# Altium footprint library ProjectFootprints-20261027_001106_796.PcbLib: 50 footprints (part 1 of 4)
Each footprint in its own frame and in the unit in brackets; x right, y up, seen from the top. Pads: shape width x height; smd on the part's side, far side on the other; paste and mask are expansions set on the pad; w line width, h text height; cw(c..) or ccw(c..) is an arc to the next point about the centre after c.
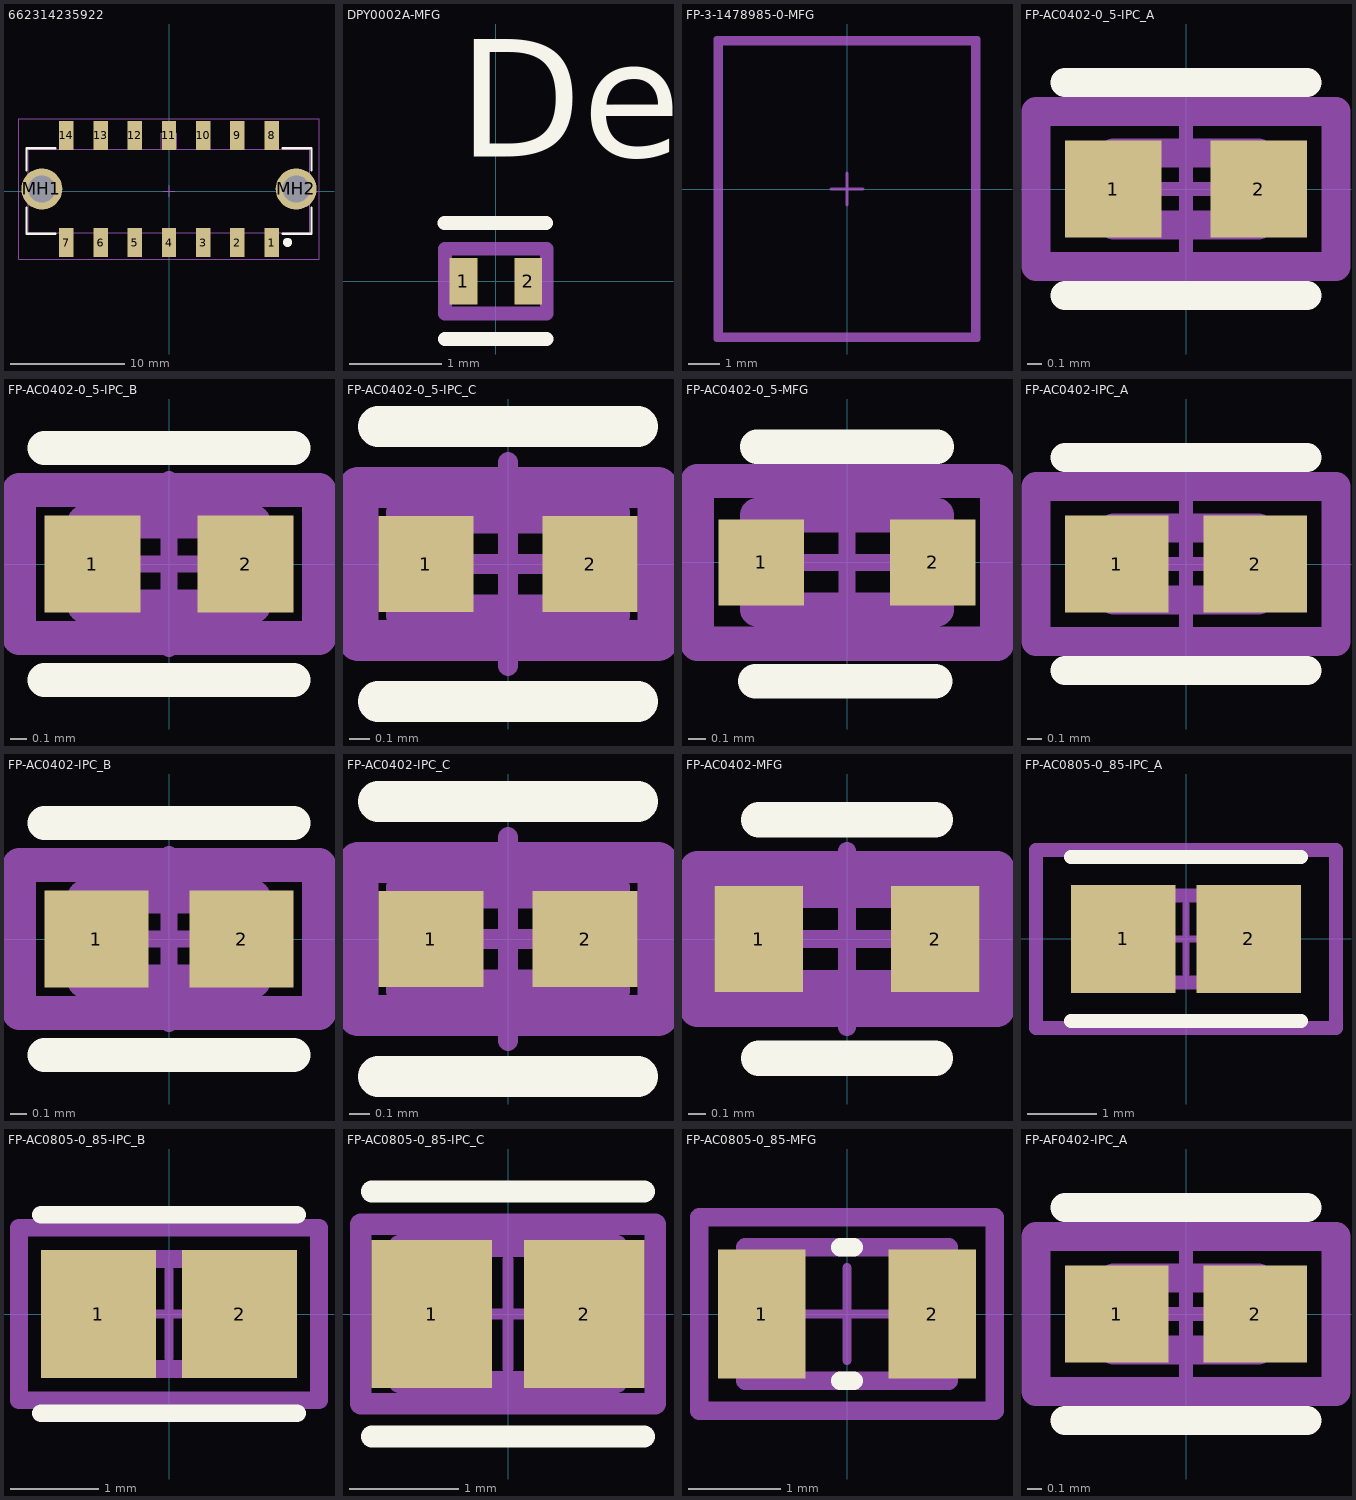
[diagram p0: the footprints below, top view; thin cyan lines are the x and y axes]

## 662314235922 [mm] "3.00mm SMT Male Dual Row Vertical Header with THT Retention Clip, 14p"
height 9.9
pads (16):
  rect 1.27x2.54 smd: 1(9,-4.52) 2(6,-4.52) 3(3,-4.52) 4(0,-4.52) 5(-3,-4.52) 6(-6,-4.52) 7(-9,-4.52) 8(9,4.88) 9(6,4.88) 10(3,4.88) 11(0,4.88) 12(-3,4.88) 13(-6,4.88) 14(-9,4.88)
  round 3.6 hole 2.41: MH1(-11.16,0.18) MH2(11.16,0.18)
Top Overlay:
  circle w0.4: c10.4,-4.5 r0.2
  lines w0.2: -12.5,-1.455 -12.5,-3.755 -9.95,-3.755 ; -12.5,1.815 -12.5,3.755 -9.95,3.755 ; 9.95,-3.755 12.5,-3.755 12.5,-1.455 ; 9.95,3.755 12.5,3.755 12.5,1.815
Top Designator:
  text ".Designator" at -7.498,-0.5 h1.5
Top Component Outline:
  lines w0.1: -9.32,-3.68 -9.32,-5.45 -8.68,-5.45 -8.68,-3.68 ; -9.32,3.68 -9.32,5.95 -8.68,5.95 -8.68,3.68 ; -6.32,-3.68 -6.32,-5.45 -5.68,-5.45 -5.68,-3.68 ; -6.32,3.68 -6.32,5.95 -5.68,5.95 -5.68,3.68 ; -3.32,-3.68 -3.32,-5.45 -2.68,-5.45 -2.68,-3.68 ; -3.32,3.68 -3.32,5.95 -2.68,5.95 -2.68,3.68 ; -0.7,3.68 -0.7,5.08 0.7,5.08 0.7,3.68 ; -0.32,-3.68 -0.32,-5.45 0.32,-5.45 0.32,-3.68 ; -0.32,3.68 -0.32,5.95 0.32,5.95 0.32,3.68 ; 2.68,-3.68 2.68,-5.45 3.32,-5.45 3.32,-3.68 ; 2.68,3.68 2.68,5.95 3.32,5.95 3.32,3.68 ; 5.68,-3.68 5.68,-5.45 6.32,-5.45 6.32,-3.68 ; 5.68,3.68 5.68,5.95 6.32,5.95 6.32,3.68 ; 8.68,-3.68 8.68,-5.45 9.32,-5.45 9.32,-3.68 ; 8.68,3.68 8.68,5.95 9.32,5.95 9.32,3.68 ; -12.35,-3.68 -12.35,3.68 12.35,3.68 12.35,-3.68 -12.35,-3.68
Top 3D Body:
  lines w0.1: -9.32,-3.68 -9.32,-5.45 -8.68,-5.45 -8.68,-3.68 ; -9.32,3.68 -9.32,5.95 -8.68,5.95 -8.68,3.68 ; -6.32,-3.68 -6.32,-5.45 -5.68,-5.45 -5.68,-3.68 ; -6.32,3.68 -6.32,5.95 -5.68,5.95 -5.68,3.68 ; -3.32,-3.68 -3.32,-5.45 -2.68,-5.45 -2.68,-3.68 ; -3.32,3.68 -3.32,5.95 -2.68,5.95 -2.68,3.68 ; -0.7,3.68 -0.7,5.08 0.7,5.08 0.7,3.68 ; -0.32,-3.68 -0.32,-5.45 0.32,-5.45 0.32,-3.68 ; -0.32,3.68 -0.32,5.95 0.32,5.95 0.32,3.68 ; 2.68,-3.68 2.68,-5.45 3.32,-5.45 3.32,-3.68 ; 2.68,3.68 2.68,5.95 3.32,5.95 3.32,3.68 ; 5.68,-3.68 5.68,-5.45 6.32,-5.45 6.32,-3.68 ; 5.68,3.68 5.68,5.95 6.32,5.95 6.32,3.68 ; 8.68,-3.68 8.68,-5.45 9.32,-5.45 9.32,-3.68 ; 8.68,3.68 8.68,5.95 9.32,5.95 9.32,3.68 ; -12.35,-3.68 -12.35,3.68 12.35,3.68 12.35,-3.68 -12.35,-3.68
Top Courtyard:
  lines w0.05: -13.16,-5.99 13.16,-5.99 13.16,6.35 -13.16,6.35 -13.16,-5.99
Top Component Center:
  lines w0.05: -0.5,0 0.5,0 ; 0,-0.5 0,0.5
3D body "662314235922.stp": height 11.42, standoff -3.08, extent -12.35,-5.45 12.35,5.95

## DPY0002A-MFG [mm]
pads (2):
  rect 0.3x0.5 smd paste+0 mask+0: 1(-0.35,0) 2(0.35,0)
Top Overlay:
  lines w0.15: -0.556,0.629 0.544,0.629 ; -0.55,-0.625 0.55,-0.625
  text ".Designator" at -3.492,-0.635 h1.27
  text "Designator920" at -0.406,1.346 h1.27
Top 3D Body:
  lines w0.15: -0.55,-0.35 0.55,-0.35 0.55,0.35 -0.55,0.35 -0.55,-0.35
  text ".Designator" at -3.492,-0.635 h1.27
3D body "DPY0002A.stp": height 0.45, standoff 0, extent -0.5,-0.3 0.5,0.3

## FP-3-1478985-0-MFG [mm]
Top Assembly:
  lines w0.2: -4.1,-4.72 4.1,-4.72 4.1,4.72 -4.1,4.72 -4.1,-4.72
Top 3D Body:
  lines w0.2: -4,-4.62 4,-4.62 4,4.62 -4,4.62 -4,-4.62
Top Courtyard:
  lines w0.2: -4.1,-4.72 4.1,-4.72 4.1,4.72 -4.1,4.72 -4.1,-4.72
Top Component Center:
  lines w0.1: -0.5,0 0.5,0 ; 0,-0.5 0,0.5
3D body "Conn_TE_Connectivity_3-1478985-0_eec.STEP": height 0.25, standoff 0, extent -4.1,-4.72 4.1,4.72

## FP-AC0402-0_5-IPC_A [mm]
pads (2):
  rect 0.666x0.672 smd paste+0 mask+0: 1(-0.503,0) 2(0.503,0)
Top Overlay:
  lines w0.2: -0.836,-0.736 0.836,-0.736 ; -0.836,0.736 0.836,0.736
Top Assembly:
  lines w0.2: -1.036,-0.536 1.036,-0.536 1.036,0.536 -1.036,0.536 -1.036,-0.536
  text ".Designator" at 0,0.188 h1
Top 3D Body:
  lines w0.2: -0.5,-0.25 0.5,-0.25 0.5,0.25 -0.5,0.25 -0.5,-0.25
Top Courtyard:
  lines w0.2: -1.036,-0.536 1.036,-0.536 1.036,0.536 -1.036,0.536 -1.036,-0.536
Top Component Center:
  lines w0.1: -0.5,0 0.5,0 ; 0,-0.5 0,0.5
3D body "Cap_Yageo_AC0402KRX7R7BB471_eec.STEP": height 0.25, standoff 0, extent -1.036,-0.536 1.036,0.536

## FP-AC0402-0_5-IPC_B [mm]
pads (2):
  rect 0.566x0.572 smd paste+0 mask+0: 1(-0.453,0) 2(0.453,0)
Top Overlay:
  lines w0.2: -0.736,-0.686 0.736,-0.686 ; -0.736,0.686 0.736,0.686
Top Assembly:
  lines w0.2: -0.886,-0.436 -0.886,0.436 0.886,0.436 0.886,-0.436 -0.886,-0.436
  text ".Designator" at 0,0.188 h1
Top 3D Body:
  lines w0.2: -0.5,-0.25 -0.5,0.25 0.5,0.25 0.5,-0.25 -0.5,-0.25
Top Courtyard:
  lines w0.2: -0.886,-0.436 -0.886,0.436 0.886,0.436 0.886,-0.436 -0.886,-0.436
Top Component Center:
  lines w0.1: -0.5,0 0.5,0 ; 0,-0.5 0,0.5
3D body "Cap_Yageo_AC0402KRX7R7BB471_eec.STEP": height 0.25, standoff 0, extent -0.886,-0.436 0.886,0.436

## FP-AC0402-0_5-IPC_C [mm]
pads (2):
  rect 0.466x0.472 smd paste+0 mask+0: 1(-0.403,0) 2(0.403,0)
Top Overlay:
  lines w0.2: -0.636,-0.675 0.636,-0.675 ; -0.636,0.675 0.636,0.675
Top Assembly:
  lines w0.2: -0.736,-0.375 -0.736,0.375 0.736,0.375 0.736,-0.375 -0.736,-0.375
  text ".Designator" at 0,0.188 h1
Top 3D Body:
  lines w0.2: -0.5,-0.25 -0.5,0.25 0.5,0.25 0.5,-0.25 -0.5,-0.25
Top Courtyard:
  lines w0.2: -0.736,-0.375 -0.736,0.375 0.736,0.375 0.736,-0.375 -0.736,-0.375
Top Component Center:
  lines w0.1: -0.5,0 0.5,0 ; 0,-0.5 0,0.5
3D body "Cap_Yageo_AC0402KRX7R7BB471_eec.STEP": height 0.25, standoff 0, extent -0.736,-0.375 0.736,0.375

## FP-AC0402-0_5-MFG [mm]
pads (2):
  rect 0.5x0.5 smd paste+0 mask+0: 1(-0.5,0) 2(0.5,0)
Top Overlay:
  lines w0.2: -0.536,-0.693 0.514,-0.693 ; -0.525,0.675 0.525,0.675
Top Assembly:
  lines w0.2: -0.875,-0.475 -0.875,0.475 0.875,0.475 0.875,-0.475 -0.875,-0.475
  text ".Designator" at 0,0.188 h1
Top 3D Body:
  lines w0.2: -0.525,-0.275 -0.525,0.275 0.525,0.275 0.525,-0.275 -0.525,-0.275
Top Courtyard:
  lines w0.2: -0.875,-0.475 -0.875,0.475 0.875,0.475 0.875,-0.475 -0.875,-0.475
Top Component Center:
  lines w0.1: -0.5,0 0.5,0 ; 0,-0.5 0,0.5
3D body "Cap_Yageo_AC0402KRX7R7BB471_eec.STEP": height 0.25, standoff 0, extent -0.875,-0.475 0.875,0.475

## FP-AC0402-IPC_A [mm]
pads (2):
  rect 0.715x0.672 smd paste+0 mask+0: 1(-0.479,0) 2(0.479,0)
Top Overlay:
  lines w0.2: -0.836,-0.736 0.836,-0.736 ; -0.836,0.736 0.836,0.736
Top Assembly:
  lines w0.2: -1.036,-0.536 -1.036,0.536 1.036,0.536 1.036,-0.536 -1.036,-0.536
  text ".Designator" at 0,0.188 h1
Top 3D Body:
  lines w0.2: -0.5,-0.25 -0.5,0.25 0.5,0.25 0.5,-0.25 -0.5,-0.25
Top Courtyard:
  lines w0.2: -1.036,-0.536 -1.036,0.536 1.036,0.536 1.036,-0.536 -1.036,-0.536
Top Component Center:
  lines w0.1: -0.5,0 0.5,0 ; 0,-0.5 0,0.5
3D body "Res_Yageo_AC0402FR-0716R2L_eec.STEP": height 0.25, standoff 0, extent -1.036,-0.536 1.036,0.536

## FP-AC0402-IPC_B [mm]
pads (2):
  rect 0.615x0.572 smd paste+0 mask+0: 1(-0.429,0) 2(0.429,0)
Top Overlay:
  lines w0.2: -0.736,-0.686 0.736,-0.686 ; -0.736,0.686 0.736,0.686
Top Assembly:
  lines w0.2: -0.886,-0.436 -0.886,0.436 0.886,0.436 0.886,-0.436 -0.886,-0.436
  text ".Designator" at 0,0.188 h1
Top 3D Body:
  lines w0.2: -0.5,-0.25 -0.5,0.25 0.5,0.25 0.5,-0.25 -0.5,-0.25
Top Courtyard:
  lines w0.2: -0.886,-0.436 -0.886,0.436 0.886,0.436 0.886,-0.436 -0.886,-0.436
Top Component Center:
  lines w0.1: -0.5,0 0.5,0 ; 0,-0.5 0,0.5
3D body "Res_Yageo_AC0402FR-0716R2L_eec.STEP": height 0.25, standoff 0, extent -0.886,-0.436 0.886,0.436

## FP-AC0402-IPC_C [mm]
pads (2):
  rect 0.515x0.472 smd paste+0 mask+0: 1(-0.379,0) 2(0.379,0)
Top Overlay:
  lines w0.2: -0.636,-0.675 0.636,-0.675 ; -0.636,0.675 0.636,0.675
Top Assembly:
  lines w0.2: -0.736,-0.375 -0.736,0.375 0.736,0.375 0.736,-0.375 -0.736,-0.375
  text ".Designator" at 0,0.188 h1
Top 3D Body:
  lines w0.2: -0.5,-0.25 -0.5,0.25 0.5,0.25 0.5,-0.25 -0.5,-0.25
Top Courtyard:
  lines w0.2: -0.736,-0.375 -0.736,0.375 0.736,0.375 0.736,-0.375 -0.736,-0.375
Top Component Center:
  lines w0.1: -0.5,0 0.5,0 ; 0,-0.5 0,0.5
3D body "Res_Yageo_AC0402FR-0716R2L_eec.STEP": height 0.25, standoff 0, extent -0.736,-0.375 0.736,0.375

## FP-AC0402-MFG [mm]
pads (2):
  rect 0.5x0.6 smd paste+0 mask+0: 1(-0.5,0) 2(0.5,0)
Top Overlay:
  lines w0.2: -0.5,-0.675 0.5,-0.675 ; -0.5,0.675 0.5,0.675
Top Assembly:
  lines w0.2: -0.85,-0.4 -0.85,0.4 0.85,0.4 0.85,-0.4 -0.85,-0.4
  text ".Designator" at 0,0.188 h1
Top 3D Body:
  lines w0.2: -0.525,-0.275 -0.525,0.275 0.525,0.275 0.525,-0.275 -0.525,-0.275
Top Courtyard:
  lines w0.2: -0.85,-0.4 -0.85,0.4 0.85,0.4 0.85,-0.4 -0.85,-0.4
Top Component Center:
  lines w0.1: -0.5,0 0.5,0 ; 0,-0.5 0,0.5
3D body "Res_Yageo_AC0402FR-0716R2L_eec.STEP": height 0.25, standoff 0, extent -0.85,-0.4 0.85,0.4

## FP-AC0805-0_85-IPC_A [mm]
pads (2):
  rect 1.505x1.556 smd paste+0 mask+0: 1(-0.901,0) 2(0.901,0)
Top Overlay:
  lines w0.2: -1.653,-1.178 1.653,-1.178 ; -1.653,1.178 1.653,1.178
Top Assembly:
  lines w0.2: -2.153,-1.278 -2.153,1.278 2.153,1.278 2.153,-1.278 -2.153,-1.278
  text ".Designator" at 0,0.188 h1
Top 3D Body:
  lines w0.2: -1,-0.625 -1,0.625 1,0.625 1,-0.625 -1,-0.625
Top Courtyard:
  lines w0.2: -2.153,-1.278 -2.153,1.278 2.153,1.278 2.153,-1.278 -2.153,-1.278
Top Component Center:
  lines w0.1: -0.5,0 0.5,0 ; 0,-0.5 0,0.5
3D body "Cap_Yageo_AC0805JRNPOYBN151_eec.STEP": height 0.25, standoff 0, extent -2.153,-1.278 2.153,1.278

## FP-AC0805-0_85-IPC_B [mm]
pads (2):
  rect 1.305x1.456 smd paste+0 mask+0: 1(-0.801,0) 2(0.801,0)
Top Overlay:
  lines w0.2: -1.453,-1.128 1.453,-1.128 ; -1.453,1.128 1.453,1.128
Top Assembly:
  lines w0.2: -1.703,-0.978 -1.703,0.978 1.703,0.978 1.703,-0.978 -1.703,-0.978
  text ".Designator" at 0,0.188 h1
Top 3D Body:
  lines w0.2: -1,-0.625 -1,0.625 1,0.625 1,-0.625 -1,-0.625
Top Courtyard:
  lines w0.2: -1.703,-0.978 -1.703,0.978 1.703,0.978 1.703,-0.978 -1.703,-0.978
Top Component Center:
  lines w0.1: -0.5,0 0.5,0 ; 0,-0.5 0,0.5
3D body "Cap_Yageo_AC0805JRNPOYBN151_eec.STEP": height 0.25, standoff 0, extent -1.703,-0.978 1.703,0.978

## FP-AC0805-0_85-IPC_C [mm]
pads (2):
  rect 1.105x1.356 smd paste+0 mask+0: 1(-0.701,0) 2(0.701,0)
Top Overlay:
  lines w0.2: -1.253,-1.125 1.253,-1.125 ; -1.253,1.125 1.253,1.125
Top Assembly:
  lines w0.2: -1.353,-0.825 -1.353,0.825 1.353,0.825 1.353,-0.825 -1.353,-0.825
  text ".Designator" at 0,0.188 h1
Top 3D Body:
  lines w0.2: -1,-0.625 -1,0.625 1,0.625 1,-0.625 -1,-0.625
Top Courtyard:
  lines w0.2: -1.353,-0.825 -1.353,0.825 1.353,0.825 1.353,-0.825 -1.353,-0.825
Top Component Center:
  lines w0.1: -0.5,0 0.5,0 ; 0,-0.5 0,0.5
3D body "Cap_Yageo_AC0805JRNPOYBN151_eec.STEP": height 0.25, standoff 0, extent -1.353,-0.825 1.353,0.825

## FP-AC0805-0_85-MFG [mm]
pads (2):
  rect 0.95x1.4 smd paste+0 mask+0: 1(-0.925,0) 2(0.925,0)
Top Overlay:
  lines w0.2: -0.075,-0.725 0.075,-0.725 ; -0.075,0.725 0.075,0.725
Top Assembly:
  lines w0.2: -1.6,-1.05 1.6,-1.05 1.6,1.05 -1.6,1.05 -1.6,-1.05
  text ".Designator" at 0,0.188 h1
Top 3D Body:
  lines w0.2: -1.1,-0.725 1.1,-0.725 1.1,0.725 -1.1,0.725 -1.1,-0.725
Top Courtyard:
  lines w0.2: -1.6,-1.05 1.6,-1.05 1.6,1.05 -1.6,1.05 -1.6,-1.05
Top Component Center:
  lines w0.1: -0.5,0 0.5,0 ; 0,-0.5 0,0.5
3D body "Cap_Yageo_AC0805JRNPOYBN151_eec.STEP": height 0.25, standoff 0, extent -1.6,-1.05 1.6,1.05

## FP-AF0402-IPC_A [mm]
pads (2):
  rect 0.715x0.672 smd paste+0 mask+0: 1(-0.479,0) 2(0.479,0)
Top Overlay:
  lines w0.2: -0.836,-0.736 0.836,-0.736 ; -0.836,0.736 0.836,0.736
Top Assembly:
  lines w0.2: -1.036,-0.536 -1.036,0.536 1.036,0.536 1.036,-0.536 -1.036,-0.536
  text ".Designator" at 0,0.188 h1
Top 3D Body:
  lines w0.2: -0.5,-0.25 -0.5,0.25 0.5,0.25 0.5,-0.25 -0.5,-0.25
Top Courtyard:
  lines w0.2: -1.036,-0.536 -1.036,0.536 1.036,0.536 1.036,-0.536 -1.036,-0.536
Top Component Center:
  lines w0.1: -0.5,0 0.5,0 ; 0,-0.5 0,0.5
3D body "Res_Yageo_AF0402JR-7W82KL_eec.STEP": height 0.25, standoff 0, extent -1.036,-0.536 1.036,0.536